# Altium schematic symbol library TMP4718BDGKR.SchLib: 1 symbol
Pins are listed as number, name and electrical type; pins without a type are passive.

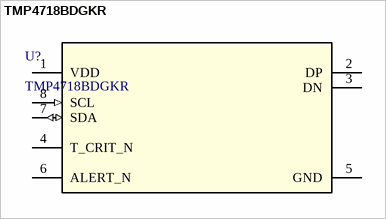
[diagram p0: symbol TMP4718BDGKR]

## TMP4718BDGKR
designator U?
High-accuracy remote and local temperature sensor with pin-programmable alert thresholds 8-VSSOP -40 to 125; Manufacturer_Name: Texas Instruments; TYPE: TYPE; RefDes: RefDes; Copyright: Copyright (C) 2026 Ultra Librarian. All rights reserved.; Manufacturer_Part_Number: TMP4718BDGKR
footprint DGK0008A-IPC_A
pins: 1 VDD (power), 2 DP, 3 DN, 4 T_CRIT_N (oc), 5 GND (power), 6 ALERT_N (oc), 7 SDA (io), 8 SCL (in)